# Altium schematic symbol library 15V电源输出隔离磁珠_BLM31PG121SN1L.SCHLIB: 1 symbol
Pins are listed as number, name and electrical type; pins without a type are passive.

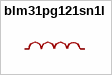
[diagram p0: symbol blm31pg121sn1l]

## blm31pg121sn1l
designator L??  (value not drawn)
阻抗@频率:120Ω@100MHz;误差:±25%;直流电阻(DCR):20mΩ;; Manufacturer: muRata(村田); AddInBom: yes; ModelId: 85bdab7b3d4c4074b81d208eb5e865b3; ModelName: L1206_L3.2-W1.6-H1.1; ModelTransform: 125.984,62.835,0,0,0,0,0,0,0; Tolerance: ±25%; DC Resistance(DCR): 20mΩ; Current Rating: 3.5A; Number of Circuits: 1; Symbol: BLM31PG121SN1L; LCSC Part Name: 单路 1206磁珠 阻抗120Ω@100MHz; SupplierPart: C85841; ManufacturerPart: BLM31PG121SN1L; Supplier Footprint: 1206; JLCPCB Part Class: Extended Part; Datasheet: https://item.szlcsc.com/datasheet/BLM31PG121SN1L/87017.html; Supplier: LCSC; ConvertToPcb: yes; FootprintName: L1206; Impedance @ Frequency: 120Ω@100MHz; Operating Temperature: -55℃~+125℃
footprint L1206
pins: 1, 2